# Altium footprint library Cole_.PcbLib: 167 footprints (part 10 of 11)
Each footprint in its own frame and in the unit in brackets; x right, y up, seen from the top. Pads: shape width x height; smd on the part's side, far side on the other; paste and mask are expansions set on the pad; w line width, h text height; cw(c..) or ccw(c..) is an arc to the next point about the centre after c.
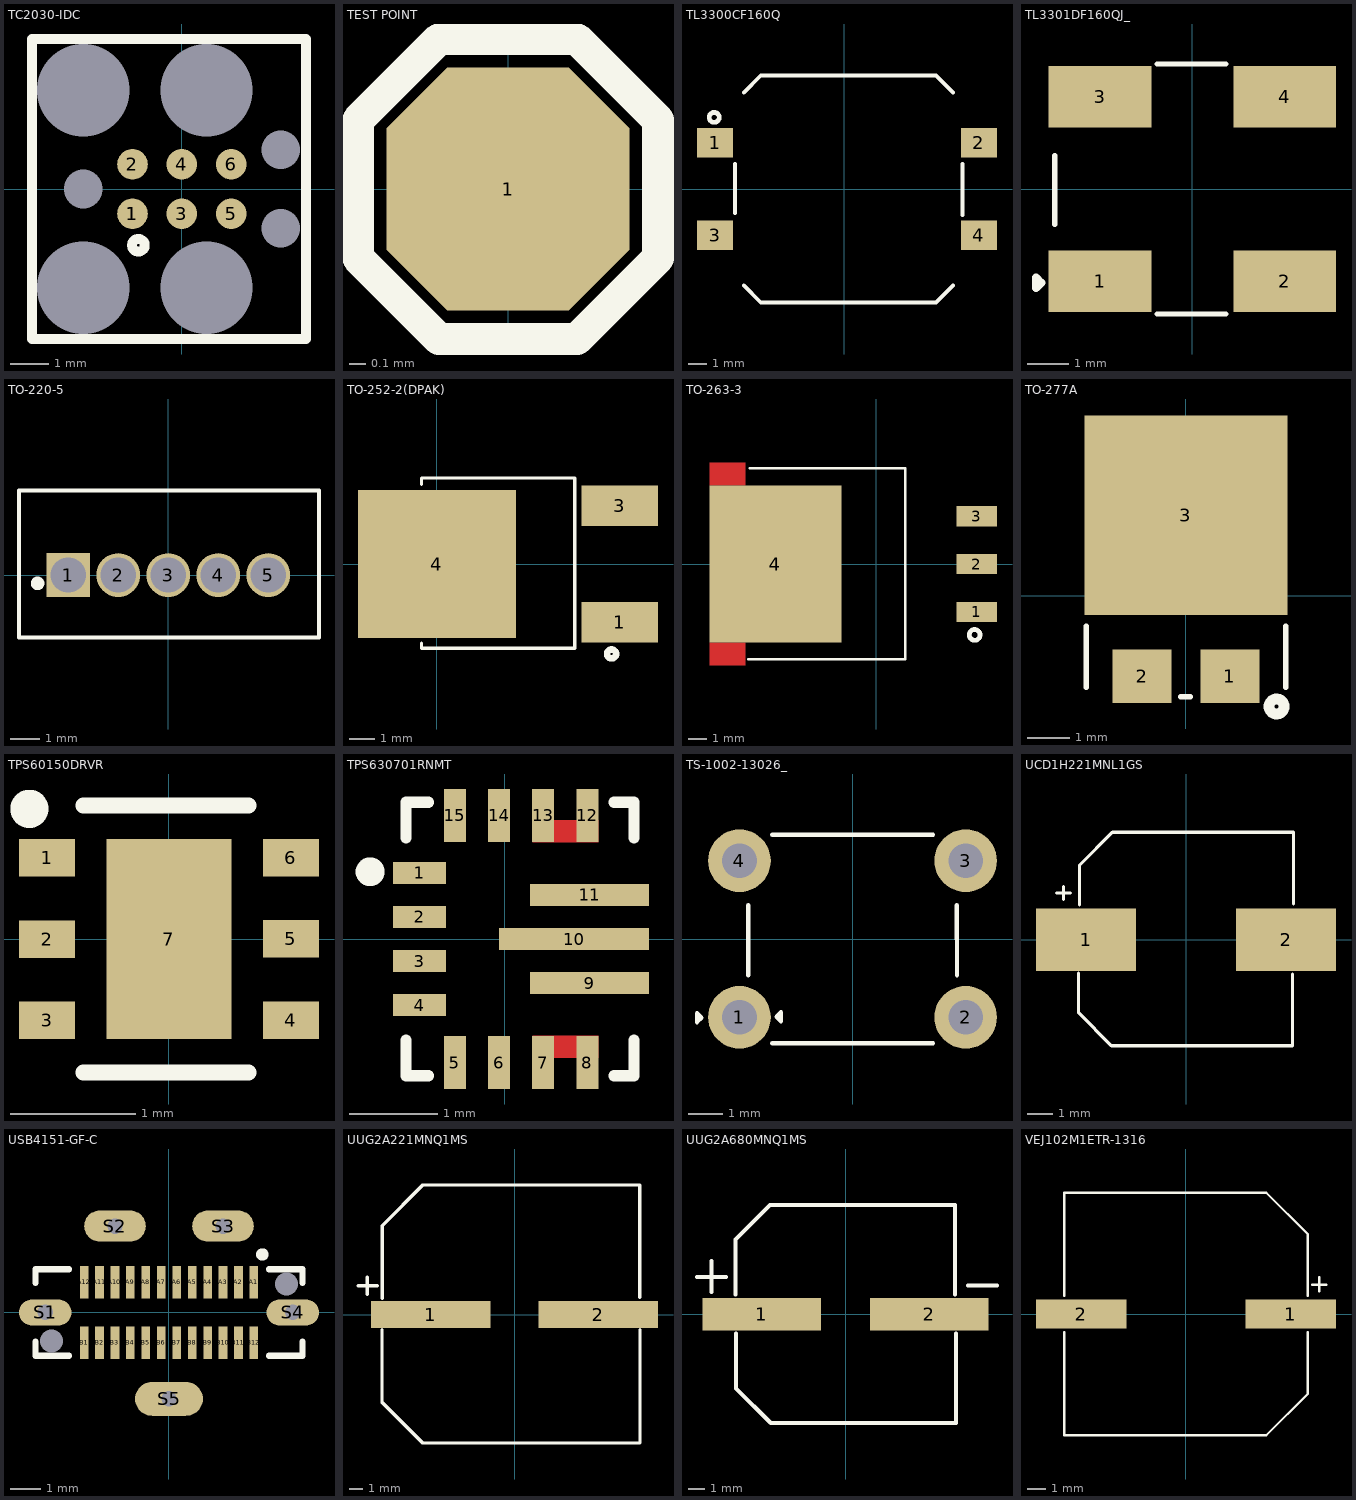
[diagram p9: the footprints below, top view; thin cyan lines are the x and y axes]

## TC2030-IDC [mm] "CABLE ADAPTER 6 POS"
pads (14):
  round 0.787 smd: 1(-1.27,-0.635) 1(-1.27,-0.635) 2(-1.27,0.635) 3(0,-0.635) 4(0,0.635) 5(1.27,-0.635) 6(1.27,0.635)
  round 0 hole 2.375: MP1(-2.54,-2.54) MP2(0.635,-2.54) MP3(0.635,2.54) MP4(-2.54,2.54)
  round 0 hole 0.991: MP5(-2.54,0) MP6(2.54,-1.016) MP7(2.54,1.016)
Top Overlay:
  circle w0.254: c-1.118,-1.448 r0.163
  lines w0.254: -3.861,-3.861 -3.861,3.861 3.2,3.861 3.2,-3.861 -3.861,-3.861

## TEST POINT [mil]
pads (1):
  oct 60x60 smd: 1(0,0)
Top Overlay:
  lines w7.87: -17,-37 17,-37 ; -17,-37 -37,-17 -37,17 -17,37 ; -17,-37 17,-37 ; -17,37 17,37 ; -17,37 17,37 ; 17,-37 37,-17 37,17 17,37

## TL3300CF160Q [mm] "SWITCH TACTILE SPST-NO 0.05A 12V"
height 8.5
pads (4):
  rect 1.95x1.6 smd: 1(-6.975,2.5) 2(7.249,2.5) 3(-6.975,-2.5) 4(7.249,-2.5)
Top Overlay:
  circle w0.254: c-7.023,3.861 r0.27
  lines w0.2: -5.905,-1.295 -5.905,1.342 ; -5.423,-5.207 -4.508,-6.121 4.941,-6.121 5.855,-5.207 ; -5.423,5.207 -4.508,6.121 4.941,6.121 5.855,5.207 ; 6.363,-1.397 6.363,1.368
3D body "Tactal Switch - SMD (12mmx12mmx10.0mm).stp": height 10, standoff 0, extent -7.582,-6.032 7.785,5.982

## TL3301DF160QJ_ [mm]
pads (4):
  rect 2.5x1.5 smd: 1(-2.25,-2.25) 2(2.25,-2.25) 3(-2.25,2.25) 4(2.25,2.25)
Top Overlay:
  lines w0.127: -3.353,-0.864 -3.353,0.813 ; -0.864,-3.048 0.813,-3.048 ; -0.864,3.048 0.813,3.048
  lines w0.2: -3.81,-2.413 -3.81,-2.159 -3.683,-2.286 -3.81,-2.413
3D body "TL3301DFxxxxJ.stp": height 13.32, standoff 0.02, extent -3.301,-3 3.301,3

## TO-220-5 [mm]
pads (5):
  rect 1.5x1.5 hole 1.2: 1(-3.42,0)
  round 1.5 hole 1.2: 2(-1.71,0) 3(0,0) 4(1.71,0) 5(3.42,0)
Top Overlay:
  circle w0.254: c-4.47,-0.279 r0.105
  lines w0.127: -5.105,-2.134 -5.105,2.896 5.156,2.896 5.156,-2.134 -5.105,-2.134
3D body "User Library-to-220-5 v2.step": height 15, standoff -12.82, extent -5.055,-2.08 5.105,2.87

## TO-252-2(DPAK) [mm] "Fixed 40V 5V 500mV @ 250mA TO-252-2(DPAK) Dropout Regulators(LDO) RoHS"
pads (3):
  rect 3x1.6 smd: 1(7.18,-2.283) 3(7.18,2.287)
  rect 6.2x5.8 smd: 4(0,0)
Top Overlay:
  circle w0.254: c6.858,-3.531 r0.178
  lines w0.127: -0.61,-3.099 -0.61,-3.302 5.41,-3.302 5.41,3.378 -0.61,3.378 -0.61,3.124
3D body "DPAK-3_ONS.step": height 1.75, standoff 0, extent -0.599,-3.34 7.468,3.391

## TO-263-3 [mm] "Fixed 26V 12V 1V @ 1A TO-263-3 Dropout Regulators(LDO) RoHS"
pads (4):
  rect 2.16x1.07 smd: 1(5.339,-2.54) 2(5.339,0) 3(5.339,2.54)
  rect 6.99x8.33 smd: 4(-5.339,0)
Top Layer:
  rectangle: -8.833,-5.387 -6.923,-4.152
  rectangle: -8.833,4.164 -6.923,5.399
Top Overlay:
  circle w0.254: c5.232,-3.759 r0.287
  lines w0.127: -6.782,-5.059 1.549,-5.059 1.549,5.08 -6.706,5.08
3D body "NOPB.STEP": height 4.75, standoff -0.05, extent -8.217,-5.105 6.134,5.055

## TO-277A [mm]
pads (3):
  rect 1.4x1.27 smd: 1(1.04,-1.903) 2(-1.04,-1.903)
  rect 4.8x4.72 smd: 3(0,1.903)
Top Overlay:
  circle w0.254: c2.143,-2.616 r0.178
  lines w0.127: -2.362,-2.159 -2.362,-0.711 ; -0.127,-2.388 0.102,-2.388 ; 2.362,-2.159 2.362,-0.711
3D body "86A.STEP": height 1.2, standoff 0, extent -2.3,-2.337 2.3,4.163

## TPS60150DRVR [mm]
pads (7):
  rect 0.45x0.3 smd: 1(-0.975,0.65) 2(-0.975,0) 3(-0.975,-0.65) 4(0.975,-0.65) 5(0.975,0) 6(0.975,0.65)
  rect 1x1.6 smd: 7(0,0)
Top Overlay:
  circle w0.254: c-1.118,1.041 r0.025
  lines w0.127: -0.686,-1.067 0.635,-1.067 ; -0.686,1.067 0.635,1.067
3D body "DRV0006A.stp": height 0.78, standoff -0.02, extent -1,-1 1,1

## TPS630701RNMT [mm]
pads (15):
  rect 0.6x0.25 smd: 1(-0.962,0.75) 2(-0.962,0.25) 3(-0.962,-0.25) 4(-0.962,-0.75)
  rect 0.25x0.6 smd: 5(-0.562,-1.4) 6(-0.062,-1.4) 7(0.437,-1.4) 8(0.937,-1.4) 12(0.937,1.4) 13(0.437,1.4) 14(-0.062,1.4) 15(-0.562,1.4)
  rect 1.35x0.25 smd: 9(0.962,-0.5) 11(0.962,0.5)
  rect 1.7x0.25 smd: 10(0.787,0)
Top Layer:
  rectangle: 0.317,1.096 1.067,1.346
  rectangle: 0.317,-1.346 1.067,-1.096
Top Overlay:
  circle w0.254: c-1.524,0.762 r0.036
  lines w0.127: -1.118,-1.143 -1.118,-1.549 -0.864,-1.549 ; -1.118,1.143 -1.118,1.549 -0.864,1.549 ; 1.239,-1.549 1.467,-1.549 1.467,-1.143 ; 1.239,1.549 1.467,1.549 1.467,1.143
3D body "TPS630701RNMT.STEP": height 1, standoff 0, extent -1.072,-1.5 1.428,1.5

## TS-1002-13026_ [mm]
pads (4):
  round 1.8 hole 1: 1(-3.25,-2.25) 2(3.25,-2.25) 3(3.25,2.25) 4(-3.25,2.25)
Top Overlay:
  lines w0.127: -3,-1.041 -2.997,0.965 ; -2.311,-3 0,-3 2.311,-3 ; -2.311,3 0,3 2.311,3 ; 2.997,0.965 3,-1.041 ; -4.47,-2.388 -4.343,-2.261 -4.47,-2.134 -4.47,-2.388 ; -2.184,-2.235 -2.057,-2.108 -2.057,-2.362 -2.184,-2.235
3D body "XUNPU TS-1002-13026.STEP": height 19.98, standoff -3.2, extent -4.242,-2.997 4.13,2.997

## UCD1H221MNL1GS [mm] "CAP ALUM 220UF 20% 50V SMD"
pads (2):
  rect 4x2.5 smd: 1(-4,0) 2(4,0)
Top Overlay:
  lines w0.127: -5.184,1.866 -4.63,1.866 ; -4.902,1.618 -4.902,2.121 ; -4.297,-1.346 -4.297,-2.93 -2.985,-4.242 4.255,-4.242 4.255,-1.372 ; -4.258,1.397 -4.258,2.981 -2.946,4.293 4.294,4.293 4.294,1.422
3D body "PCAP_8x10-ELECT_NCA.step": height 10.34, standoff 0, extent -4.673,-4.229 4.623,4.28

## USB4151-GF-C [mm]
pads (31):
  rect 0.28x1.05 smd: A1(2.75,0.975) A2(2.25,0.975) A3(1.75,0.975) A4(1.25,0.975) A5(0.75,0.975) A6(0.25,0.975) A7(-0.25,0.975) A8(-0.75,0.975) A9(-1.25,0.975) A10(-1.75,0.975) A11(-2.25,0.975) A12(-2.75,0.975) B1(-2.75,-0.975) B2(-2.25,-0.975) B3(-1.75,-0.975) B4(-1.25,-0.975) B5(-0.75,-0.975) B6(-0.25,-0.975) B7(0.25,-0.975) B8(0.75,-0.975) B9(1.25,-0.975) B10(1.75,-0.975) B11(2.25,-0.975) B12(2.75,-0.975)
  oval 1.7x0.85 hole 0.5 square: S1(-4.01,0) S4(4.01,0)
  oval 2x1 hole 0.5 square: S2(-1.75,2.8) S3(1.75,2.8)
  oval 2.2x1.1 hole 0.5 square: S5(0,-2.8)
  round 0 hole 0.75 unplated: ""(-3.81,-0.93) ""(3.81,0.92)
Top Overlay:
  circle w0.2: c3.023,1.88 r0.1
  lines w0.2: -4.33,-0.95 -4.33,-1.4 -3.24,-1.4 ; -4.33,0.95 -4.33,1.4 -3.24,1.4 ; 3.24,-1.4 4.33,-1.4 4.33,-0.95 ; 3.24,1.4 4.33,1.4 4.33,0.95
3D body "USB4151-GF-C--3DModel-STEP-56544.STEP": height 11.1, standoff -1.25, extent -4.33,-2.875 4.33,2.875

## UUG2A221MNQ1MS [mm] "CAP ALUM 220UF 20% 100V SMD"
pads (2):
  rect 8.9x2 smd: 1(-6.25,0) 2(6.25,0)
Top Overlay:
  lines w0.254: -11.672,2.159 -10.224,2.159 ; -10.986,1.499 -10.986,2.794 ; -9.883,-1.127 -9.883,-6.475 -9.883,-6.539 -6.846,-9.576 9.359,-9.576 9.359,-1.143 ; -9.868,1.219 -9.868,6.631 -6.83,9.668 9.334,9.668 9.334,1.295
3D body "CAP_UCD_18X16P5_NCH.step": height 17.55, standoff 0, extent -9.754,-9.55 9.754,9.55

## UUG2A680MNQ1MS [mm] "CAP ALUM 68UF 20% 100V SMD"
pads (2):
  rect 7.3x2 smd: 1(-5.15,0) 2(5.15,0)
Top Overlay:
  lines w0.254: -9.144,2.286 -7.366,2.286 ; -8.255,1.372 -8.255,3.277 ; -6.782,1.219 -6.782,4.597 -4.648,6.731 6.743,6.731 6.743,1.219 ; -6.737,-1.194 -6.737,-4.572 -4.603,-6.706 6.788,-6.706 6.788,-1.194 ; 7.544,1.778 9.322,1.778
3D body "CAP_UCD_12P5X13P5_NCH.step": height 14.56, standoff 0, extent -6.998,-6.819 6.998,6.769

## VEJ102M1ETR-1316 [mm]
pads (2):
  rect 5x1.6 smd: 1(5.8,0) 2(-5.8,0)
Top Overlay:
  lines w0.127: -6.731,-0.991 -6.731,-6.706 4.445,-6.706 6.731,-4.42 6.731,-0.991 ; -6.731,0.991 -6.731,6.706 4.445,6.706 6.731,4.42 6.731,0.991 ; 6.985,1.626 7.772,1.626 ; 7.366,1.245 7.366,2.032
3D body "Part1.STEP": height 16.26, standoff -0.04, extent -6.85,-6.5 6.85,6.5